# Altium footprint library Miscellaneous Devices.PcbLib: 306 footprints (part 19 of 20)
Each footprint in its own frame and in the unit in brackets; x right, y up, seen from the top. Pads: shape width x height; smd on the part's side, far side on the other; paste and mask are expansions set on the pad; w line width, h text height; cw(c..) or ccw(c..) is an arc to the next point about the centre after c.
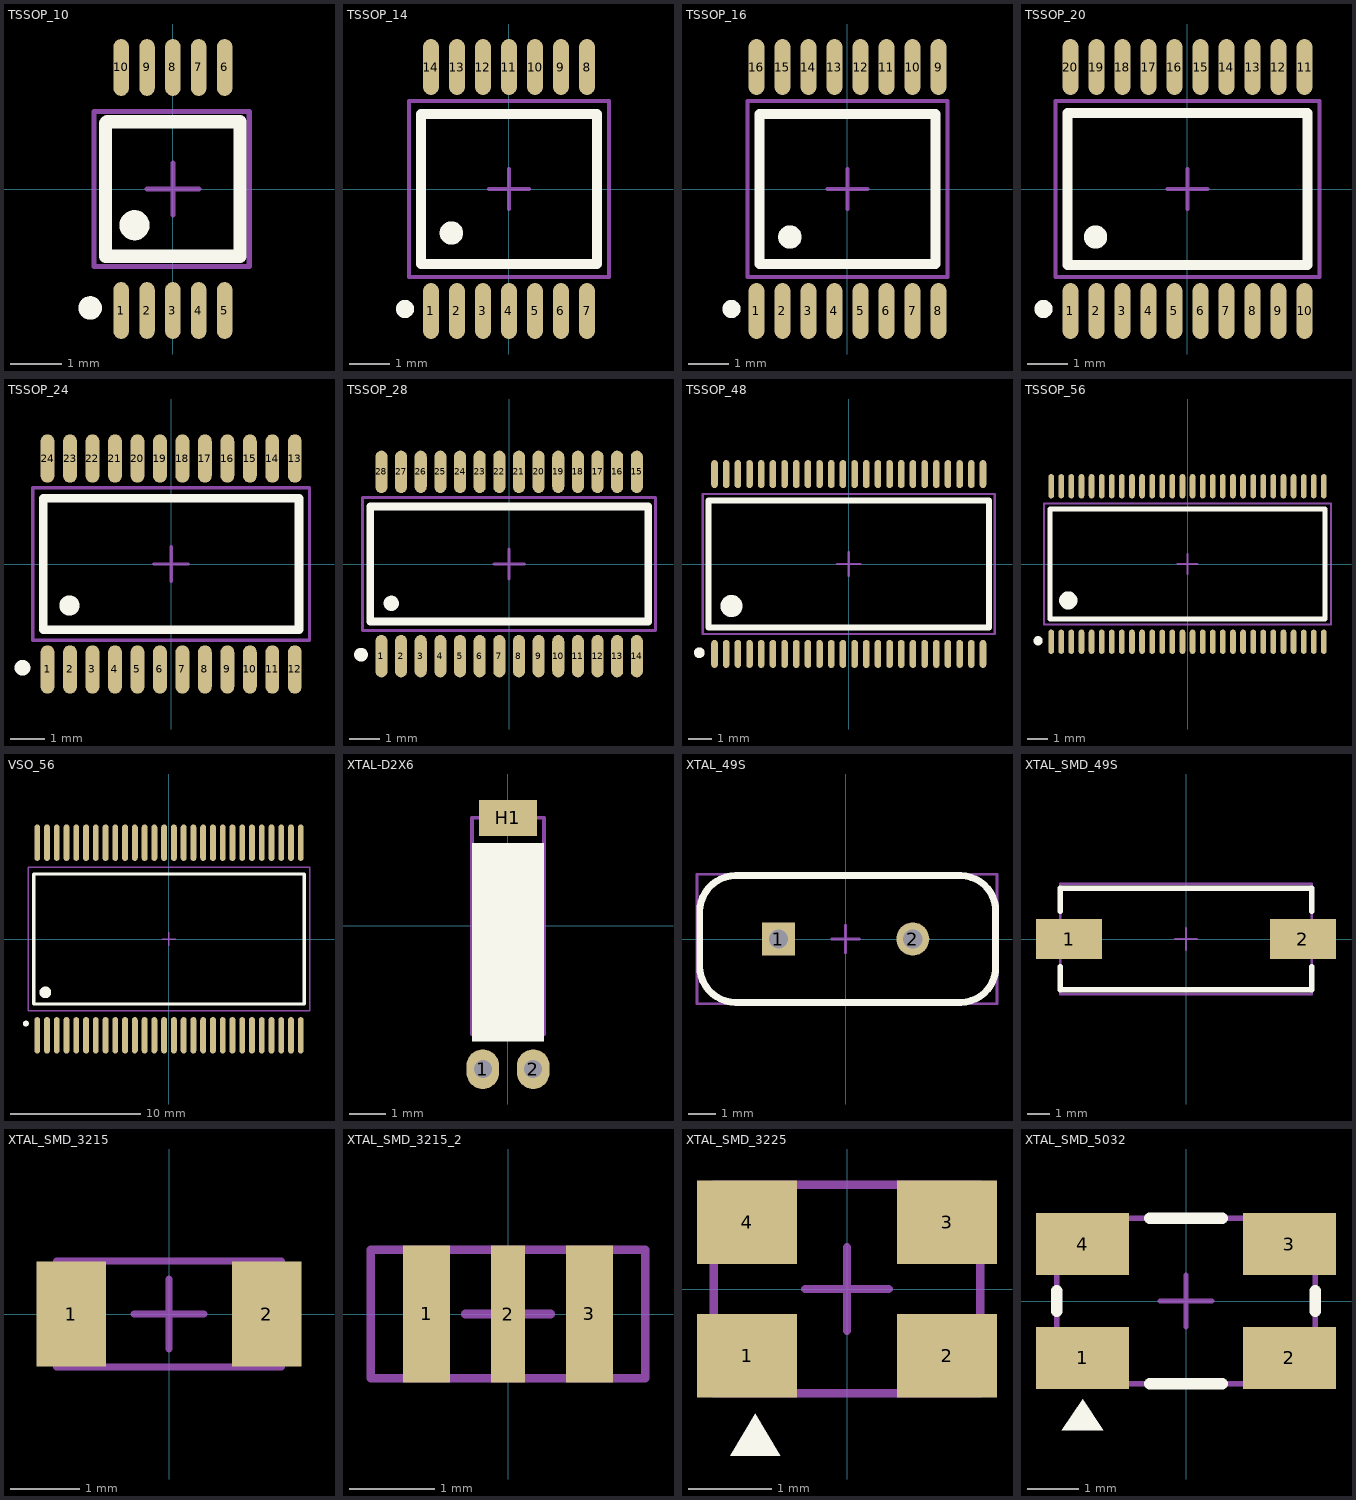
[diagram p18: the footprints below, top view; thin cyan lines are the x and y axes]

## TSSOP_10 [mm] "0.5"
pads (10):
  oval 0.3x1.1 smd: 1(-1,-2.35) 2(-0.5,-2.35) 3(0,-2.35) 4(0.5,-2.35) 5(1,-2.35) 6(1,2.35) 7(0.5,2.35) 8(0,2.35) 9(-0.5,2.35) 10(-1,2.35)
Top Overlay:
  circle w0.254: c-1.6,-2.3 r0.1
  circle w0.3: c-0.741,-0.7 r0.141
  lines w0.254: -1.3,-1.3 -1.3,1.275 -1.275,1.3 1.3,1.3 1.3,-1.3 -1.275,-1.3
Mechanical 15:
  lines w0.1: -0.5,0 0.5,0 ; 0,-0.5 0,0.5 ; -1.525,-1.5 1.475,-1.5 1.475,1.5 -1.525,1.5 -1.525,-1.5
3D body: height 1.1, standoff 0, extent -1.5,-2.5 1.5,2.5

## TSSOP_14 [mm] "0.65"
pads (14):
  oval 0.4x1.4 smd: 1(-1.95,-3.05) 2(-1.3,-3.05) 3(-0.65,-3.05) 4(0,-3.05) 5(0.65,-3.05) 6(1.3,-3.05) 7(1.95,-3.05) 8(1.95,3.05) 9(1.3,3.05) 10(0.65,3.05) 11(0,3.05) 12(-0.65,3.05) 13(-1.3,3.05) 14(-1.95,3.05)
Top Overlay:
  circle w0.3: c-1.441,-1.1 r0.141
  circle w0.254: c-2.6,-3 r0.1
  lines w0.254: -2.2,-1.875 -2.2,1.875 2.2,1.875 2.2,-1.875 -2.2,-1.875
Mechanical 15:
  lines w0.1: -0.5,0 0.5,0 ; 0,-0.5 0,0.5 ; -2.5,-2.2 2.5,-2.2 2.5,2.2 -2.5,2.2 -2.5,-2.2
3D body: height 1.2, standoff 0, extent -2.5,-3.2 2.5,3.2

## TSSOP_16 [mm] "0.65"
pads (16):
  oval 0.4x1.4 smd: 1(-2.275,-3.05) 2(-1.625,-3.05) 3(-0.975,-3.05) 4(-0.325,-3.05) 5(0.325,-3.05) 6(0.975,-3.05) 7(1.625,-3.05) 8(2.275,-3.05) 9(2.275,3.05) 10(1.625,3.05) 11(0.975,3.05) 12(0.325,3.05) 13(-0.325,3.05) 14(-0.975,3.05) 15(-1.625,3.05) 16(-2.275,3.05)
Top Overlay:
  circle w0.254: c-2.9,-3 r0.1
  circle w0.3: c-1.441,-1.2 r0.141
  lines w0.254: -2.2,-1.875 -2.2,1.875 2.2,1.875 2.2,-1.875 -2.2,-1.875
Mechanical 15:
  lines w0.1: -0.5,0 0.5,0 ; 0,-0.5 0,0.5 ; -2.5,-2.2 -2.5,2.2 2.5,2.2 2.5,-2.2 -2.5,-2.2
3D body: height 1.2, standoff 0, extent -2.5,-3.2 2.5,3.2

## TSSOP_20 [mm] "0.65"
pads (20):
  oval 0.4x1.4 smd: 1(-2.925,-3.05) 2(-2.275,-3.05) 3(-1.625,-3.05) 4(-0.975,-3.05) 5(-0.325,-3.05) 6(0.325,-3.05) 7(0.975,-3.05) 8(1.625,-3.05) 9(2.275,-3.05) 10(2.925,-3.05) 11(2.925,3.05) 12(2.275,3.05) 13(1.625,3.05) 14(0.975,3.05) 15(0.325,3.05) 16(-0.325,3.05) 17(-0.975,3.05) 18(-1.625,3.05) 19(-2.275,3.05) 20(-2.925,3.05)
Top Overlay:
  circle w0.3: c-2.3,-1.2 r0.141
  circle w0.254: c-3.6,-3 r0.1
  lines w0.254: -3,-1.9 -3,1.9 3,1.9 3,-1.9 -3,-1.9
Mechanical 15:
  lines w0.1: -0.5,0 0.5,0 ; 0,-0.5 0,0.5 ; -3.3,-2.2 -3.3,2.2 3.3,2.2 3.3,-2.2 -3.3,-2.2
3D body: height 1.2, standoff 0, extent -3.25,-3.2 3.25,3.2

## TSSOP_24 [mm] "0.65"
pads (24):
  oval 0.4x1.4 smd: 1(-3.575,-3.05) 2(-2.925,-3.05) 3(-2.275,-3.05) 4(-1.625,-3.05) 5(-0.975,-3.05) 6(-0.325,-3.05) 7(0.325,-3.05) 8(0.975,-3.05) 9(1.625,-3.05) 10(2.275,-3.05) 11(2.925,-3.05) 12(3.575,-3.05) 13(3.575,3.05) 14(2.925,3.05) 15(2.275,3.05) 16(1.625,3.05) 17(0.975,3.05) 18(0.325,3.05) 19(-0.325,3.05) 20(-0.975,3.05) 21(-1.625,3.05) 22(-2.275,3.05) 23(-2.925,3.05) 24(-3.575,3.05)
Top Overlay:
  circle w0.254: c-4.3,-3 r0.1
  circle w0.3: c-2.941,-1.2 r0.141
  lines w0.254: -3.7,-1.9 -3.7,1.9 3.7,1.9 3.7,-1.9 -3.7,-1.9
Mechanical 15:
  lines w0.1: -0.5,0 0.5,0 ; 0,-0.5 0,0.5 ; -4,-2.2 -4,2.2 4,2.2 4,-2.2 -4,-2.2
3D body: height 1.2, standoff 0, extent -3.9,-3.2 3.9,3.2

## TSSOP_28 [mm] "0.65"
pads (28):
  oval 0.4x1.4 smd: 1(-4.225,-3.05) 2(-3.575,-3.05) 3(-2.925,-3.05) 4(-2.275,-3.05) 5(-1.625,-3.05) 6(-0.975,-3.05) 7(-0.325,-3.05) 8(0.325,-3.05) 9(0.975,-3.05) 10(1.625,-3.05) 11(2.275,-3.05) 12(2.925,-3.05) 13(3.575,-3.05) 14(4.225,-3.05) 15(4.225,3.05) 16(3.575,3.05) 17(2.925,3.05) 18(2.275,3.05) 19(1.625,3.05) 20(0.975,3.05) 21(0.325,3.05) 22(-0.325,3.05) 23(-0.975,3.05) 24(-1.625,3.05) 25(-2.275,3.05) 26(-2.925,3.05) 27(-3.575,3.05) 28(-4.225,3.05)
Top Overlay:
  circle w0.254: c-4.9,-3 r0.1
  circle w0.3: c-3.9,-1.3 r0.1
  lines w0.254: -4.6,-1.9 -4.6,1.9 4.6,1.9 4.6,-1.9 -4.6,-1.9
Mechanical 15:
  lines w0.1: -0.5,0 0.5,0 ; 0,-0.5 0,0.5 ; -4.85,-2.2 -4.85,2.2 4.85,2.2 4.85,-2.2 -4.85,-2.2
3D body: height 1.2, standoff 0, extent -4.85,-3.2 4.85,3.2

## TSSOP_48 [mm] "0.5"
pads (48):
  oval 0.28x1.2 smd: 1(-5.75,-3.85) 2(-5.25,-3.85) 3(-4.75,-3.85) 4(-4.25,-3.85) 5(-3.75,-3.85) 6(-3.25,-3.85) 7(-2.75,-3.85) 8(-2.25,-3.85) 9(-1.75,-3.85) 10(-1.25,-3.85) 11(-0.75,-3.85) 12(-0.25,-3.85) 13(0.25,-3.85) 14(0.75,-3.85) 15(1.25,-3.85) 16(1.75,-3.85) 17(2.25,-3.85) 18(2.75,-3.85) 19(3.25,-3.85) 20(3.75,-3.85) 21(4.25,-3.85) 22(4.75,-3.85) 23(5.25,-3.85) 24(5.75,-3.85) 25(5.75,3.85) 26(5.25,3.85) 27(4.75,3.85) 28(4.25,3.85) 29(3.75,3.85) 30(3.25,3.85) 31(2.75,3.85) 32(2.25,3.85) 33(1.75,3.85) 34(1.25,3.85) 35(0.75,3.85) 36(0.25,3.85) 37(-0.25,3.85) 38(-0.75,3.85) 39(-1.25,3.85) 40(-1.75,3.85) 41(-2.25,3.85) 42(-2.75,3.85) 43(-3.25,3.85) 44(-3.75,3.85) 45(-4.25,3.85) 46(-4.75,3.85) 47(-5.25,3.85) 48(-5.75,3.85)
Top Overlay:
  circle w0.254: c-6.4,-3.8 r0.1
  circle w0.5: c-5.024,-1.8 r0.224
  lines w0.254: -6,-2.725 6,-2.725 6,2.725 -6,2.725 -6,-2.725
Mechanical 15:
  lines w0.1: -0.5,0 0.5,0 ; 0,-0.5 0,0.5 ; -6.25,-3 -6.25,3 6.25,3 6.25,-3 -6.25,-3
3D body: height 1.2, standoff 0, extent -6.25,-4.05 6.25,4.05

## TSSOP_56 [mm] "0.5"
pads (56):
  oval 0.28x1.2 smd: 1(-6.75,-3.85) 2(-6.25,-3.85) 3(-5.75,-3.85) 4(-5.25,-3.85) 5(-4.75,-3.85) 6(-4.25,-3.85) 7(-3.75,-3.85) 8(-3.25,-3.85) 9(-2.75,-3.85) 10(-2.25,-3.85) 11(-1.75,-3.85) 12(-1.25,-3.85) 13(-0.75,-3.85) 14(-0.25,-3.85) 15(0.25,-3.85) 16(0.75,-3.85) 17(1.25,-3.85) 18(1.75,-3.85) 19(2.25,-3.85) 20(2.75,-3.85) 21(3.25,-3.85) 22(3.75,-3.85) 23(4.25,-3.85) 24(4.75,-3.85) 25(5.25,-3.85) 26(5.75,-3.85) 27(6.25,-3.85) 28(6.75,-3.85) 29(6.75,3.85) 30(6.25,3.85) 31(5.75,3.85) 32(5.25,3.85) 33(4.75,3.85) 34(4.25,3.85) 35(3.75,3.85) 36(3.25,3.85) 37(2.75,3.85) 38(2.25,3.85) 39(1.75,3.85) 40(1.25,3.85) 41(0.75,3.85) 42(0.25,3.85) 43(-0.25,3.85) 44(-0.75,3.85) 45(-1.25,3.85) 46(-1.75,3.85) 47(-2.25,3.85) 48(-2.75,3.85) 49(-3.25,3.85) 50(-3.75,3.85) 51(-4.25,3.85) 52(-4.75,3.85) 53(-5.25,3.85) 54(-5.75,3.85) 55(-6.25,3.85) 56(-6.75,3.85)
Top Overlay:
  circle w0.254: c-7.4,-3.8 r0.1
  circle w0.5: c-5.9,-1.8 r0.2
  lines w0.254: -6.8,-2.725 6.8,-2.725 6.8,2.725 -6.8,2.725 -6.8,-2.725
Mechanical 15:
  lines w0.1: -0.5,0 0.5,0 ; 0,-0.5 0,0.5 ; -7.1,-3 -7.1,3 7.1,3 7.1,-3 -7.1,-3
3D body: height 1.14, standoff -0.4, extent -7.04,-4.045 7.04,4.1

## VSO_56 [mm] "0.75"
pads (56):
  oval 0.45x2.8 smd: 1(-10.125,-7.4) 2(-9.375,-7.4) 3(-8.625,-7.4) 4(-7.875,-7.4) 5(-7.125,-7.4) 6(-6.375,-7.4) 7(-5.625,-7.4) 8(-4.875,-7.4) 9(-4.125,-7.4) 10(-3.375,-7.4) 11(-2.625,-7.4) 12(-1.875,-7.4) 13(-1.125,-7.4) 14(-0.375,-7.4) 15(0.375,-7.4) 16(1.125,-7.4) 17(1.875,-7.4) 18(2.625,-7.4) 19(3.375,-7.4) 20(4.125,-7.4) 21(4.875,-7.4) 22(5.625,-7.4) 23(6.375,-7.4) 24(7.125,-7.4) 25(7.875,-7.4) 26(8.625,-7.4) 27(9.375,-7.4) 28(10.125,-7.4) 29(10.125,7.4) 30(9.375,7.4) 31(8.625,7.4) 32(7.875,7.4) 33(7.125,7.4) 34(6.375,7.4) 35(5.625,7.4) 36(4.875,7.4) 37(4.125,7.4) 38(3.375,7.4) 39(2.625,7.4) 40(1.875,7.4) 41(1.125,7.4) 42(0.375,7.4) 43(-0.375,7.4) 44(-1.125,7.4) 45(-1.875,7.4) 46(-2.625,7.4) 47(-3.375,7.4) 48(-4.125,7.4) 49(-4.875,7.4) 50(-5.625,7.4) 51(-6.375,7.4) 52(-7.125,7.4) 53(-7.875,7.4) 54(-8.625,7.4) 55(-9.375,7.4) 56(-10.125,7.4)
Top Overlay:
  circle w0.5: c-9.5,-4.1 r0.2
  circle w0.254: c-11,-6.5 r0.1
  lines w0.254: -10.4,-5 10.4,-5 10.4,5 -10.4,5 -10.4,-5
Mechanical 15:
  lines w0.1: -0.5,0 0.5,0 ; 0,-0.5 0,0.5 ; -10.8,-5.5 10.8,-5.5 10.8,5.5 -10.8,5.5 -10.8,-5.5
3D body: height 3.3, standoff 0, extent -10.825,-7.8 10.825,7.842

## XTAL-D2X6 [mm]
pads (3):
  oval 0.9x1.1 hole 0.5: 1(-0.7,-3.975) 2(0.7,-3.975)
  rect 1.6x1 smd: H1(0,3)
Top Overlay:
  rectangle: -1,-3.2 1,2.3
Mechanical 15:
  lines w0.1: -1,-3 1,-3 1,3 -1,3 -1,-3
3D body: height 2, standoff -1, extent -1,-4.225 1,3.475

## XTAL_49S [mm]
pads (2):
  rect 1.2x1.2 hole 0.7: 1(-2.44,0)
  round 1.2 hole 0.7: 2(2.44,0)
Top Overlay:
  lines w0.254: -5.3,-1 ccw(c-4,-1) -4,-2.3 4.2,-2.3 ccw(c4.175,-1.025) 5.45,-1 5.45,1 ccw(c4.175,1.025) 4.2,2.3 -4,2.3 ccw(c-4,1) -5.3,1 -5.3,-1
Mechanical 15:
  lines w0.1: -0.5,0 0.5,0 ; 0,-0.5 0,0.5 ; -5.4,-2.35 5.5,-2.35 5.5,2.35 -5.4,2.35 -5.4,-2.35
3D body: height 3.09, standoff -2.54, extent -5.268,-1.524 5.4,1.524

## XTAL_SMD_49S [mm]
pads (2):
  rect 3x1.8 smd: 1(-5.3,0) 2(5.3,0)
Top Overlay:
  lines w0.254: -5.7,-1.25 -5.7,-2.3 5.7,-2.3 5.7,-1.25 ; -5.7,1.25 -5.7,2.3 5.7,2.3 5.7,1.25
Mechanical 15:
  lines w0.1: -0.5,0 0.5,0 ; 0,-0.5 0,0.5 ; -5.7,-2.5 5.7,-2.5 5.7,2.5 -5.7,2.5 -5.7,-2.5
3D body: height 4.4, standoff 0.1, extent -6.4,-2.43 6.4,2.4

## XTAL_SMD_3215 [mm]
pads (2):
  rect 1x1.5 smd: 1(-1.4,0) 2(1.4,0)
Mechanical 15:
  lines w0.1: -0.5,0 0.5,0 ; 0,-0.5 0,0.5 ; -1.61,-0.76 -1.61,0.76 1.61,0.76 1.61,-0.76 -1.61,-0.76
3D body: height 0.91, standoff 0, extent -1.61,-0.76 1.61,0.76

## XTAL_SMD_3215_2 [mm] "CSTCE16M0V53-R0"
pads (3):
  rect 0.55x1.6 smd: 1(-0.95,0) 3(0.95,0)
  rect 0.4x1.6 smd: 2(0,0)
Mechanical 15:
  lines w0.1: -0.5,0 0.5,0 ; 0,-0.5 0,0.5 ; -1.6,-0.75 -1.6,0.75 1.6,0.75 1.6,-0.75 -1.6,-0.75
3D body: height 0.91, standoff 0, extent -1.61,-0.76 1.61,0.76

## XTAL_SMD_3225 [mm]
pads (4):
  rect 1.2x1 smd: 1(-1.2,-0.8) 2(1.2,-0.8) 3(1.2,0.8) 4(-1.2,0.8)
Top Overlay:
  region: -0.8,-2 -1.4,-2 -1.1,-1.5
Mechanical 15:
  lines w0.1: -0.5,0 0.5,0 ; 0,-0.5 0,0.5 ; -1.6,-1.25 -1.6,1.25 1.6,1.25 1.6,-1.25 -1.6,-1.25
3D body: height 0.6, standoff 0, extent -1.6,-1.25 1.6,1.25

## XTAL_SMD_5032 [mm]
pads (4):
  rect 1.8x1.2 smd: 1(-2,-1.1) 2(2,-1.1) 3(2,1.1) 4(-2,1.1)
Top Overlay:
  region: -2,-1.9 -2.4,-2.5 -1.6,-2.5
  lines w0.22: -2.5,-0.2 -2.5,0.2 ; -0.7,-1.6 0.7,-1.6 ; -0.7,1.6 0.7,1.6 ; 2.5,-0.2 2.5,0.2
Mechanical 15:
  lines w0.1: -0.5,0 0.5,0 ; 0,-0.5 0,0.5 ; -2.5,-1.6 2.5,-1.6 2.5,1.6 -2.5,1.6 -2.5,-1.6
3D body: height 1, standoff 0, extent -2.5,-1.6 2.5,1.6